# Altium schematic symbol library DRV8411APWPR.SchLib: 1 symbol
Pins are listed as number, name and electrical type; pins without a type are passive.

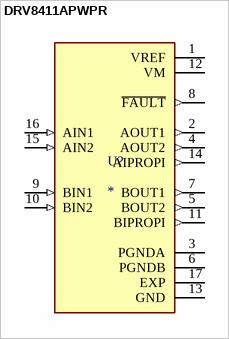
[diagram p0: symbol DRV8411APWPR]

## DRV8411APWPR
designator U?
1.65-V to 11-V, 4-A dual H-bridge motor driver with IPROPI current regulation; MF: Texas Instruments; MP: DRV8411APWPR; SnapEDA_Link: https://www.snapeda.com/parts/DRV8411APWPR/Texas+Instruments/view-part/?ref=snap; Package: TSSOP-16 Texas Instruments; Value: *; Check_prices: https://www.snapeda.com/parts/DRV8411APWPR/Texas+Instruments/view-part/?ref=eda
footprint IC_DRV8411APWPR
pins: 1 VREF (power), 2 AOUT1 (out), 3 PGNDA (power), 4 AOUT2 (out), 5 BOUT2 (out), 6 PGNDB (power), 7 BOUT1 (out), 8 ~{FAULT} (out), 9 BIN1 (in), 10 BIN2 (in), 11 BIPROPI (out), 12 VM (power), 13 GND (power), 14 AIPROPI (out), 15 AIN2 (in), 16 AIN1 (in), 17 EXP